# Altium footprint library FootPrintLib_8.PcbLib: 590 footprints (part 27 of 37)
Each footprint in its own frame and in the unit in brackets; x right, y up, seen from the top. Pads: shape width x height; smd on the part's side, far side on the other; paste and mask are expansions set on the pad; w line width, h text height; cw(c..) or ccw(c..) is an arc to the next point about the centre after c.
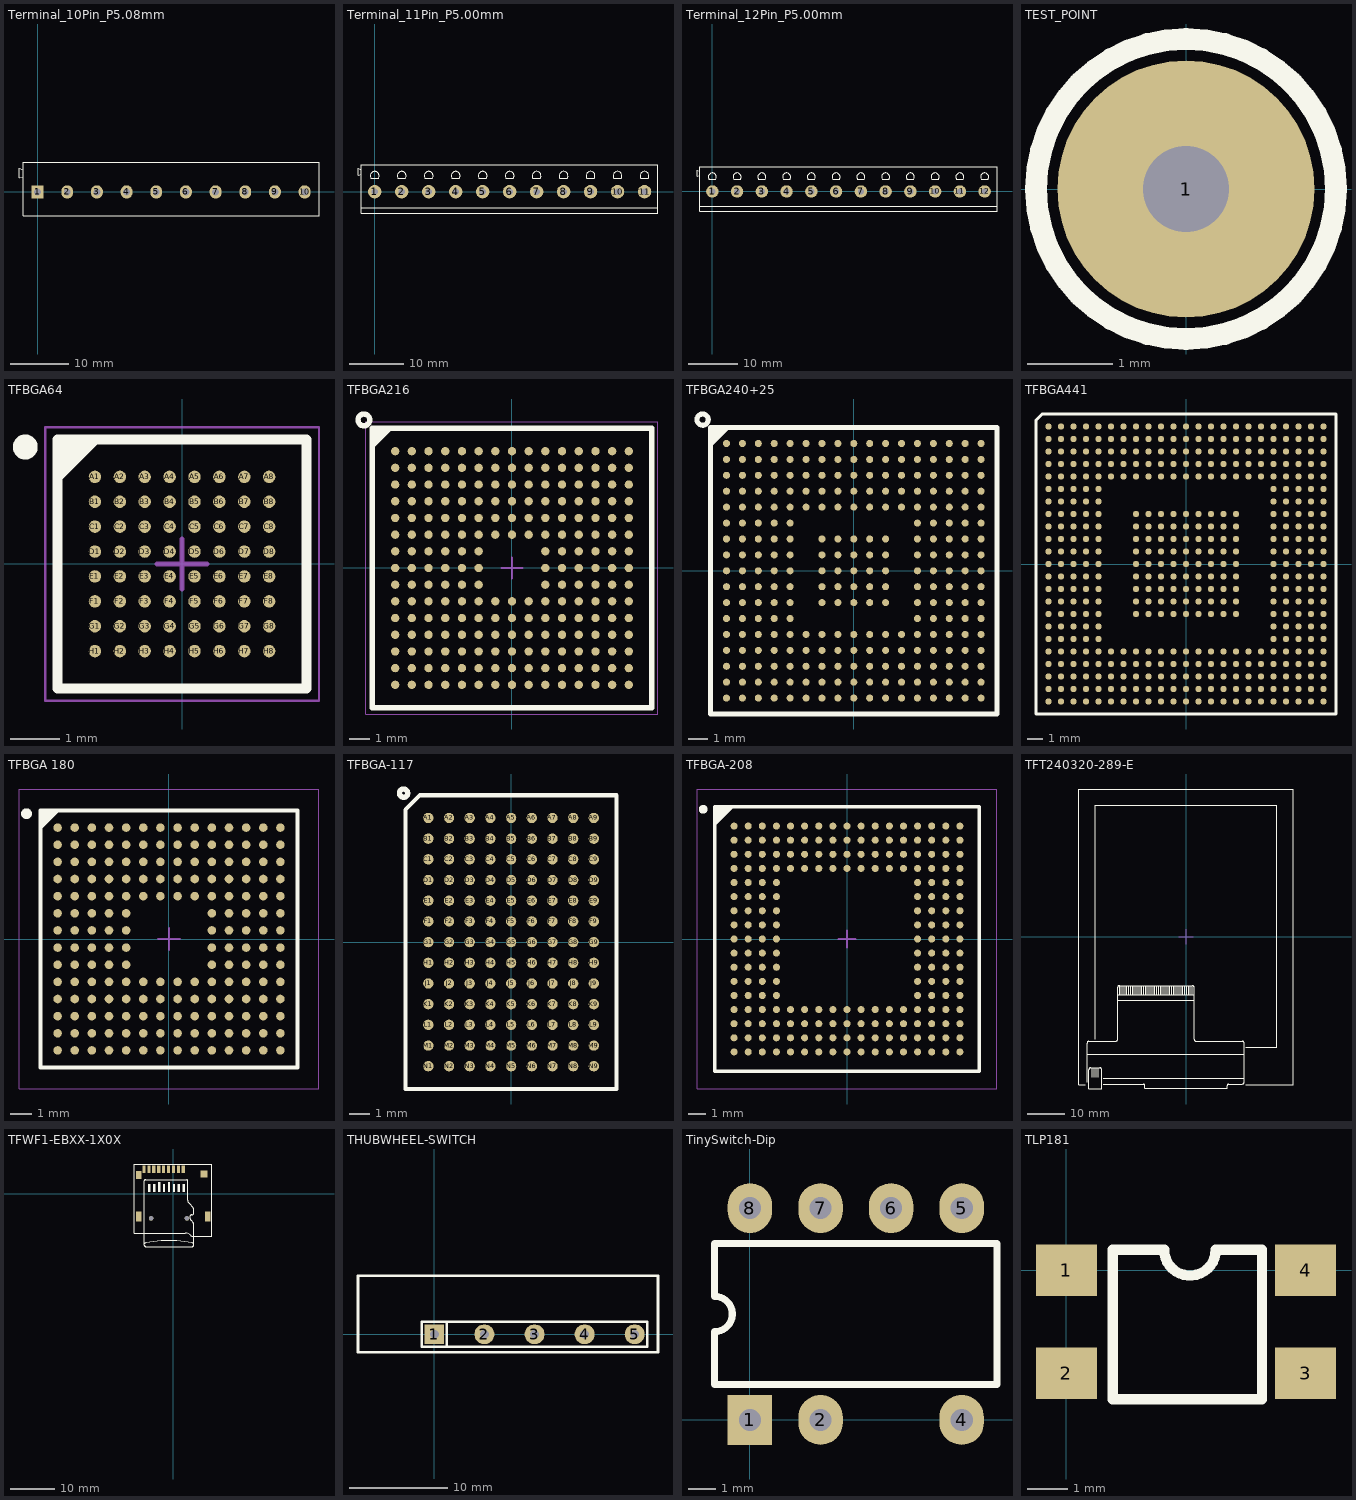
[diagram p26: the footprints below, top view; thin cyan lines are the x and y axes]

## Terminal_10Pin_P5.08mm [mil] "Terminal Block; 10Pin; Pitch 5.08mm;"
height 496.06
pads (10):
  rect 80x90 hole 46: 1(0.08,-0.13)
  oval 80x90 hole 46: 2(200.08,-0.13) 3(400.08,-0.13) 4(600.08,-0.13) 5(800.08,-0.13) 6(1000.08,-0.13) 7(1200.08,-0.13) 8(1400.08,-0.13) 9(1600.08,-0.13) 10(1800.08,-0.13)
Top Overlay:
  lines w7: -96.92,99.87 -124.92,95.2 -124.92,159.2 -96.92,149.87 ; -96.92,-160.13 -96.92,199.87 1897.08,199.87 1897.08,-160.13 -96.92,-160.13
3D body "Socket Blue_10Pin.STEP": height 493, standoff -263.18, extent -126.92,-160.63 1896.08,196.37

## Terminal_11Pin_P5.00mm [mm] "Terminal Block; 11Pin; Pitch 5.00mm; Body 5500x900mm"
height 12.6
pads (11):
  round 2.5 hole 1.2: 1(0,0) 2(5,0) 3(10,0) 4(15,0) 5(20,0) 6(25,0) 7(30,0) 8(35,0) 9(40,0) 10(45,0) 11(50,0)
Top Overlay:
  lines w0.2: -2.5,-3 52.5,-3 ; -2.5,3.275 -3.1,3.025 -3.1,4.325 -2.5,4.075 ; -2.5,-4 52.5,-4 52.5,5 -2.5,5 -2.5,-4 ; -0.7,2.5 cw(c0,2.929) 0.7,2.5 -0.7,2.5 ; 4.3,2.5 cw(c5,2.929) 5.7,2.5 4.3,2.5 ; 9.3,2.5 cw(c10,2.929) 10.7,2.5 9.3,2.5 ; 14.3,2.5 cw(c15,2.929) 15.7,2.5 14.3,2.5 ; 19.3,2.5 cw(c20,2.929) 20.7,2.5 19.3,2.5 ; 24.3,2.5 cw(c25,2.929) 25.7,2.5 24.3,2.5 ; 29.3,2.5 cw(c30,2.929) 30.7,2.5 29.3,2.5 ; 34.3,2.5 cw(c35,2.929) 35.7,2.5 34.3,2.5 ; 39.3,2.5 cw(c40,2.929) 40.7,2.5 39.3,2.5 ; 44.3,2.5 cw(c45,2.929) 45.7,2.5 44.3,2.5 ; 49.3,2.5 cw(c50,2.929) 50.7,2.5 49.3,2.5
3D body "terminal_blocks_a-tb500-ta11.stp": height 12.65, standoff -3.65, extent -3.1,-4 52.5,5

## Terminal_12Pin_P5.00mm [mm] "Terminal Block; 12Pin; Pitch 5.00mm; Body 6000x900mm"
height 12.6
pads (12):
  round 2.5 hole 1.2: 1(0,0) 2(5,0) 3(10,0) 4(15,0) 5(20,0) 6(25,0) 7(30,0) 8(35,0) 9(40,0) 10(45,0) 11(50,0) 12(55,0)
Top Overlay:
  lines w0.2: -2.5,-3 57.5,-3 ; -2.5,3.275 -3.1,3.025 -3.1,4.325 -2.5,4.075 ; -2.5,-4 57.5,-4 57.5,5 -2.5,5 -2.5,-4 ; -0.7,2.5 cw(c0,2.929) 0.7,2.5 -0.7,2.5 ; 4.3,2.5 cw(c5,2.929) 5.7,2.5 4.3,2.5 ; 9.3,2.5 cw(c10,2.929) 10.7,2.5 9.3,2.5 ; 14.3,2.5 cw(c15,2.929) 15.7,2.5 14.3,2.5 ; 19.3,2.5 cw(c20,2.929) 20.7,2.5 19.3,2.5 ; 24.3,2.5 cw(c25,2.929) 25.7,2.5 24.3,2.5 ; 29.3,2.5 cw(c30,2.929) 30.7,2.5 29.3,2.5 ; 34.3,2.5 cw(c35,2.929) 35.7,2.5 34.3,2.5 ; 39.3,2.5 cw(c40,2.929) 40.7,2.5 39.3,2.5 ; 44.3,2.5 cw(c45,2.929) 45.7,2.5 44.3,2.5 ; 49.3,2.5 cw(c50,2.929) 50.7,2.5 49.3,2.5 ; 54.3,2.5 cw(c55,2.929) 55.7,2.5 54.3,2.5
3D body "terminal_blocks_a-tb500-ta12.stp": height 12.65, standoff -3.65, extent -3.1,-4 57.5,5

## TEST_POINT [mm]
pads (1):
  round 3 hole 1: 1(0,0)
Top Overlay:
  circle w0.254: c0,0 r1.75

## TFBGA64 [mm] "BGA, 64-Balls, Body 5x5mm, Pitch 0.5mm"
height 1.2
pads (64):
  round 0.25 smd: A1(-1.75,1.75) A2(-1.25,1.75) A3(-0.75,1.75) A4(-0.25,1.75) A5(0.25,1.75) A6(0.75,1.75) A7(1.25,1.75) A8(1.75,1.75) B1(-1.75,1.25) B2(-1.25,1.25) B3(-0.75,1.25) B4(-0.25,1.25) B5(0.25,1.25) B6(0.75,1.25) B7(1.25,1.25) B8(1.75,1.25) C1(-1.75,0.75) C2(-1.25,0.75) C3(-0.75,0.75) C4(-0.25,0.75) C5(0.25,0.75) C6(0.75,0.75) C7(1.25,0.75) C8(1.75,0.75) D1(-1.75,0.25) D2(-1.25,0.25) D3(-0.75,0.25) D4(-0.25,0.25) D5(0.25,0.25) D6(0.75,0.25) D7(1.25,0.25) D8(1.75,0.25) E1(-1.75,-0.25) E2(-1.25,-0.25) E3(-0.75,-0.25) E4(-0.25,-0.25) E5(0.25,-0.25) E6(0.75,-0.25) E7(1.25,-0.25) E8(1.75,-0.25) F1(-1.75,-0.75) F2(-1.25,-0.75) F3(-0.75,-0.75) F4(-0.25,-0.75) F5(0.25,-0.75) F6(0.75,-0.75) F7(1.25,-0.75) F8(1.75,-0.75) G1(-1.75,-1.25) G2(-1.25,-1.25) G3(-0.75,-1.25) G4(-0.25,-1.25) G5(0.25,-1.25) G6(0.75,-1.25) G7(1.25,-1.25) G8(1.75,-1.25) H1(-1.75,-1.75) H2(-1.25,-1.75) H3(-0.75,-1.75) H4(-0.25,-1.75) H5(0.25,-1.75) H6(0.75,-1.75) H7(1.25,-1.75) H8(1.75,-1.75)
Top Overlay:
  circle w0.25: c-3.15,2.35 r0.125
  region: -1.742,2.5 -2.5,1.742 -2.5,2.5
  lines w0.2: -2.5,1.742 -1.742,2.5 ; -2.5,-2.5 2.5,-2.5 2.5,2.5 -2.5,2.5 -2.5,-2.5
Mechanical 13:
  lines w0.1: -2.5,-2.5 2.5,-2.5 2.5,2.5 -2.5,2.5 -2.5,-2.5
Mechanical 15:
  lines w0.05: -2.75,-2.75 2.75,-2.75 2.75,2.75 -2.75,2.75 -2.75,-2.75
  lines w0.1: -0.5,0 0.5,0 ; 0,-0.5 0,0.5
3D body: height 1.2, standoff 0.15, extent -2.5,-2.5 2.5,2.5

## TFBGA216 [mm]
pads (216):
  round 0.4 smd: A1(-5.6,5.6) A2(-4.8,5.6) A3(-4,5.6) A4(-3.2,5.6) A5(-2.4,5.6) A6(-1.6,5.6) A7(-0.8,5.6) A8(0,5.6) A9(0.8,5.6) A10(1.6,5.6) A11(2.4,5.6) A12(3.2,5.6) A13(4,5.6) A14(4.8,5.6) A15(5.6,5.6) B1(-5.6,4.8) B2(-4.8,4.8) B3(-4,4.8) B4(-3.2,4.8) B5(-2.4,4.8) B6(-1.6,4.8) B7(-0.8,4.8) B8(0,4.8) B9(0.8,4.8) B10(1.6,4.8) B11(2.4,4.8) B12(3.2,4.8) B13(4,4.8) B14(4.8,4.8) B15(5.6,4.8) C1(-5.6,4) C2(-4.8,4) C3(-4,4) C4(-3.2,4) C5(-2.4,4) C6(-1.6,4) C7(-0.8,4) C8(0,4) C9(0.8,4) C10(1.6,4) C11(2.4,4) C12(3.2,4) C13(4,4) C14(4.8,4) C15(5.6,4) D1(-5.6,3.2) D2(-4.8,3.2) D3(-4,3.2) D4(-3.2,3.2) D5(-2.4,3.2) D6(-1.6,3.2) D7(-0.8,3.2) D8(0,3.2) D9(0.8,3.2) D10(1.6,3.2) D11(2.4,3.2) D12(3.2,3.2) D13(4,3.2) D14(4.8,3.2) D15(5.6,3.2) E1(-5.6,2.4) E2(-4.8,2.4) E3(-4,2.4) E4(-3.2,2.4) E5(-2.4,2.4) E6(-1.6,2.4) E7(-0.8,2.4) E8(0,2.4) E9(0.8,2.4) E10(1.6,2.4) E11(2.4,2.4) E12(3.2,2.4) E13(4,2.4) E14(4.8,2.4) E15(5.6,2.4) F1(-5.6,1.6) F2(-4.8,1.6) F3(-4,1.6) F4(-3.2,1.6) F5(-2.4,1.6) F6(-1.6,1.6) F7(-0.8,1.6) F8(0,1.6) F9(0.8,1.6) F10(1.6,1.6) F11(2.4,1.6) F12(3.2,1.6) F13(4,1.6) F14(4.8,1.6) F15(5.6,1.6) G1(-5.6,0.8) G2(-4.8,0.8) G3(-4,0.8) G4(-3.2,0.8) G5(-2.4,0.8) G6(-1.6,0.8) G10(1.6,0.8) G11(2.4,0.8) G12(3.2,0.8) G13(4,0.8) G14(4.8,0.8) G15(5.6,0.8) H1(-5.6,0) H2(-4.8,0) H3(-4,0) H4(-3.2,0) H5(-2.4,0) H6(-1.6,0) H10(1.6,0) H11(2.4,0) H12(3.2,0) H13(4,0) H14(4.8,0) H15(5.6,0) J1(-5.6,-0.8) J2(-4.8,-0.8) J3(-4,-0.8) J4(-3.2,-0.8) J5(-2.4,-0.8) J6(-1.6,-0.8) J10(1.6,-0.8) J11(2.4,-0.8) J12(3.2,-0.8) J13(4,-0.8) J14(4.8,-0.8) J15(5.6,-0.8) K1(-5.6,-1.6) K2(-4.8,-1.6) K3(-4,-1.6) K4(-3.2,-1.6) K5(-2.4,-1.6) K6(-1.6,-1.6) K7(-0.8,-1.6) K8(0,-1.6) K9(0.8,-1.6) K10(1.6,-1.6) K11(2.4,-1.6) K12(3.2,-1.6) K13(4,-1.6) K14(4.8,-1.6) K15(5.6,-1.6) L1(-5.6,-2.4) L2(-4.8,-2.4) L3(-4,-2.4) L4(-3.2,-2.4) L5(-2.4,-2.4) L6(-1.6,-2.4) L7(-0.8,-2.4) L8(0,-2.4) L9(0.8,-2.4) L10(1.6,-2.4) L11(2.4,-2.4) L12(3.2,-2.4) L13(4,-2.4) L14(4.8,-2.4) L15(5.6,-2.4) M1(-5.6,-3.2) M2(-4.8,-3.2) M3(-4,-3.2) M4(-3.2,-3.2) M5(-2.4,-3.2) M6(-1.6,-3.2) M7(-0.8,-3.2) M8(0,-3.2) M9(0.8,-3.2) M10(1.6,-3.2) M11(2.4,-3.2) M12(3.2,-3.2) M13(4,-3.2) M14(4.8,-3.2) M15(5.6,-3.2) N1(-5.6,-4) N2(-4.8,-4) N3(-4,-4) N4(-3.2,-4) N5(-2.4,-4) N6(-1.6,-4) N7(-0.8,-4) N8(0,-4) N9(0.8,-4) N10(1.6,-4) N11(2.4,-4) N12(3.2,-4) N13(4,-4) N14(4.8,-4) N15(5.6,-4) P1(-5.6,-4.8) P2(-4.8,-4.8) P3(-4,-4.8) P4(-3.2,-4.8) P5(-2.4,-4.8) P6(-1.6,-4.8) P7(-0.8,-4.8) P8(0,-4.8) P9(0.8,-4.8) P10(1.6,-4.8) P11(2.4,-4.8) P12(3.2,-4.8) P13(4,-4.8) P14(4.8,-4.8) P15(5.6,-4.8) R1(-5.6,-5.6) R2(-4.8,-5.6) R3(-4,-5.6) R4(-3.2,-5.6) R5(-2.4,-5.6) R6(-1.6,-5.6) R7(-0.8,-5.6) R8(0,-5.6) R9(0.8,-5.6) R10(1.6,-5.6) R11(2.4,-5.6) R12(3.2,-5.6) R13(4,-5.6) R14(4.8,-5.6) R15(5.6,-5.6)
Top Overlay:
  circle w0.254: c-7.1,7.1 r0.283
  region: -6.7,6.7 -5.7,6.7 -6.7,5.7
  lines w0.25: -6.7,-6.7 6.7,-6.7 6.7,6.7 -6.7,6.7 -6.7,-6.7
Mechanical 15:
  lines w0.05: -7,-7 -7,7 7,7 7,-7 -7,-7
  lines w0.1: -0.5,0 0.5,0 ; 0,-0.5 0,0.5
3D body "User Library-TFBGA216.STEP": height 1.09, standoff -0.01, extent -6.5,-6.5 6.5,6.5

## TFBGA240+25 [mil]
pads (265):
  round 14 smd: A1(-251.97,251.97) A2(-220.47,251.97) A3(-188.97,251.97) A4(-157.48,251.97) A5(-125.98,251.97) A6(-94.49,251.97) A7(-62.99,251.97) A8(-31.49,251.97) A9(0,251.97) A10(31.5,251.97) A11(62.99,251.97) A12(94.49,251.97) A13(125.99,251.97) A14(157.48,251.97) A15(188.98,251.97) A16(220.47,251.97) A17(251.97,251.97) B1(-251.97,220.47) B2(-220.47,220.47) B3(-188.97,220.47) B4(-157.48,220.47) B5(-125.98,220.47) B6(-94.49,220.47) B7(-62.99,220.47) B8(-31.49,220.47) B9(0,220.47) B10(31.5,220.47) B11(62.99,220.47) B12(94.49,220.47) B13(125.99,220.47) B14(157.48,220.47) B15(188.98,220.47) B16(220.47,220.47) B17(251.97,220.47) C1(-251.97,188.97) C2(-220.47,188.97) C3(-188.97,188.97) C4(-157.48,188.97) C5(-125.98,188.97) C6(-94.49,188.97) C7(-62.99,188.97) C8(-31.49,188.97) C9(0,188.97) C10(31.5,188.97) C11(62.99,188.97) C12(94.49,188.97) C13(125.99,188.97) C14(157.48,188.97) C15(188.98,188.97) C16(220.47,188.97) C17(251.97,188.97) D1(-251.97,157.48) D2(-220.47,157.48) D3(-188.97,157.48) D4(-157.48,157.48) D5(-125.98,157.48) D6(-94.49,157.48) D7(-62.99,157.48) D8(-31.49,157.48) D9(0,157.48) D10(31.5,157.48) D11(62.99,157.48) D12(94.49,157.48) D13(125.99,157.48) D14(157.48,157.48) D15(188.98,157.48) D16(220.47,157.48) D17(251.97,157.48) E1(-251.97,125.98) E2(-220.47,125.98) E3(-188.97,125.98) E4(-157.48,125.98) E5(-125.98,125.98) E6(-94.49,125.98) E7(-62.99,125.98) E8(-31.49,125.98) E9(0,125.98) E10(31.5,125.98) E11(62.99,125.98) E12(94.49,125.98) E13(125.99,125.98) E14(157.48,125.98) E15(188.98,125.98) E16(220.47,125.98) E17(251.97,125.98) F1(-251.97,94.49) F2(-220.47,94.49) F3(-188.97,94.49) F4(-157.48,94.49) F5(-125.98,94.49) F13(125.99,94.49) F14(157.48,94.49) F15(188.98,94.49) F16(220.47,94.49) F17(251.97,94.49) G1(-251.97,62.99) G2(-220.47,62.99) G3(-188.97,62.99) G4(-157.48,62.99) G5(-125.98,62.99) G7(-62.99,62.99) G8(-31.49,62.99) G9(0,62.99) G10(31.5,62.99) G11(62.99,62.99) G13(125.99,62.99) G14(157.48,62.99) G15(188.98,62.99) G16(220.47,62.99) G17(251.97,62.99) H1(-251.97,31.49) H2(-220.47,31.49) H3(-188.97,31.49) H4(-157.48,31.49) H5(-125.98,31.49) H7(-62.99,31.49) H8(-31.49,31.49) H9(0,31.49) H10(31.5,31.49) H11(62.99,31.49) H13(125.99,31.49) H14(157.48,31.49) H15(188.98,31.49) H16(220.47,31.49) H17(251.97,31.49) J1(-251.97,0) J2(-220.47,0) J3(-188.97,0) J4(-157.48,0) J5(-125.98,0) J7(-62.99,0) J8(-31.49,0) J9(0,0) J10(31.5,0) J11(62.99,0) J13(125.99,0) J14(157.48,0) J15(188.98,0) J16(220.47,0) J17(251.97,0) K1(-251.97,-31.5) K2(-220.47,-31.5) K3(-188.97,-31.5) K4(-157.48,-31.5) K5(-125.98,-31.5) K7(-62.99,-31.5) K8(-31.49,-31.5) K9(0,-31.5) K10(31.5,-31.5) K11(62.99,-31.5) K13(125.99,-31.5) K14(157.48,-31.5) K15(188.98,-31.5) K16(220.47,-31.5) K17(251.97,-31.5) L1(-251.97,-62.99) L2(-220.47,-62.99) L3(-188.97,-62.99) L4(-157.48,-62.99) L5(-125.98,-62.99) L7(-62.99,-62.99) L8(-31.49,-62.99) L9(0,-62.99) L10(31.5,-62.99) L11(62.99,-62.99) L13(125.99,-62.99) L14(157.48,-62.99) L15(188.98,-62.99) L16(220.47,-62.99) L17(251.97,-62.99) M1(-251.97,-94.49) M2(-220.47,-94.49) M3(-188.97,-94.49) M4(-157.48,-94.49) M5(-125.98,-94.49) M13(125.99,-94.49) M14(157.48,-94.49) M15(188.98,-94.49) M16(220.47,-94.49) M17(251.97,-94.49) N1(-251.97,-125.99) N2(-220.47,-125.99) N3(-188.97,-125.99) N4(-157.48,-125.99) N5(-125.98,-125.99) N6(-94.49,-125.99) N7(-62.99,-125.99) N8(-31.49,-125.99) N9(0,-125.99) N10(31.5,-125.99) N11(62.99,-125.99) N12(94.49,-125.99) N13(125.99,-125.99) N14(157.48,-125.99) N15(188.98,-125.99) N16(220.47,-125.99) N17(251.97,-125.99) P1(-251.97,-157.48) P2(-220.47,-157.48) P3(-188.97,-157.48) P4(-157.48,-157.48) P5(-125.98,-157.48) P6(-94.49,-157.48) P7(-62.99,-157.48) P8(-31.49,-157.48) P9(0,-157.48) P10(31.5,-157.48) P11(62.99,-157.48) P12(94.49,-157.48) P13(125.99,-157.48) P14(157.48,-157.48) P15(188.98,-157.48) P16(220.47,-157.48) P17(251.97,-157.48) R1(-251.97,-188.98) R2(-220.47,-188.98) R3(-188.97,-188.98) R4(-157.48,-188.98) R5(-125.98,-188.98) R6(-94.49,-188.98) R7(-62.99,-188.98) R8(-31.49,-188.98) R9(0,-188.98) R10(31.5,-188.98) R11(62.99,-188.98) R12(94.49,-188.98) R13(125.99,-188.98) R14(157.48,-188.98) R15(188.98,-188.98) R16(220.47,-188.98) R17(251.97,-188.98) T1(-251.97,-220.47) T2(-220.47,-220.47) T3(-188.97,-220.47) T4(-157.48,-220.47) T5(-125.98,-220.47) T6(-94.49,-220.47) T7(-62.99,-220.47) T8(-31.49,-220.47) T9(0,-220.47) T10(31.5,-220.47) T11(62.99,-220.47) T12(94.49,-220.47) T13(125.99,-220.47) T14(157.48,-220.47) T15(188.98,-220.47) T16(220.47,-220.47) T17(251.97,-220.47) U1(-251.97,-251.97) U2(-220.47,-251.97) U3(-188.97,-251.97) U4(-157.48,-251.97) U5(-125.98,-251.97) U6(-94.49,-251.97) U7(-62.99,-251.97) U8(-31.49,-251.97) U9(0,-251.97) U10(31.5,-251.97) U11(62.99,-251.97) U12(94.49,-251.97) U13(125.99,-251.97) U14(157.48,-251.97) U15(188.98,-251.97) U16(220.47,-251.97) U17(251.97,-251.97)
Top Overlay:
  circle w10: c-299.21,299.21 r11.14
  region: -283.46,283.46 -244.09,283.46 -283.46,244.09
  lines w9.84: -283.46,-283.46 283.46,-283.46 283.46,283.46 -283.46,283.46 -283.46,-283.46
3D body "User Library-TFBGA272.STEP": height 2.47, standoff -54.62, extent -275.59,-275.59 275.59,275.59

## TFBGA441 [mm]
pads (441):
  round 0.4 smd: A1(-8.8,8.8) A2(-8,8.8) A3(-7.2,8.8) A4(-6.4,8.8) A5(-5.6,8.8) A6(-4.8,8.8) A7(-4,8.8) A8(-3.2,8.8) A9(-2.4,8.8) A10(-1.6,8.8) A11(-0.8,8.8) A12(0,8.8) A13(0.8,8.8) A14(1.6,8.8) A15(2.4,8.8) A16(3.2,8.8) A17(4,8.8) A18(4.8,8.8) A19(5.6,8.8) A20(6.4,8.8) A21(7.2,8.8) A22(8,8.8) A23(8.8,8.8) AA1(-8.8,-7.2) AA2(-8,-7.2) AA3(-7.2,-7.2) AA4(-6.4,-7.2) AA5(-5.6,-7.2) AA6(-4.8,-7.2) AA7(-4,-7.2) AA8(-3.2,-7.2) AA9(-2.4,-7.2) AA10(-1.6,-7.2) AA11(-0.8,-7.2) AA12(0,-7.2) AA13(0.8,-7.2) AA14(1.6,-7.2) AA15(2.4,-7.2) AA16(3.2,-7.2) AA17(4,-7.2) AA18(4.8,-7.2) AA19(5.6,-7.2) AA20(6.4,-7.2) AA21(7.2,-7.2) AA22(8,-7.2) AA23(8.8,-7.2) AB1(-8.8,-8) AB2(-8,-8) AB3(-7.2,-8) AB4(-6.4,-8) AB5(-5.6,-8) AB6(-4.8,-8) AB7(-4,-8) AB8(-3.2,-8) AB9(-2.4,-8) AB10(-1.6,-8) AB11(-0.8,-8) AB12(0,-8) AB13(0.8,-8) AB14(1.6,-8) AB15(2.4,-8) AB16(3.2,-8) AB17(4,-8) AB18(4.8,-8) AB19(5.6,-8) AB20(6.4,-8) AB21(7.2,-8) AB22(8,-8) AB23(8.8,-8) AC1(-8.8,-8.8) AC2(-8,-8.8) AC3(-7.2,-8.8) AC4(-6.4,-8.8) AC5(-5.6,-8.8) AC6(-4.8,-8.8) AC7(-4,-8.8) AC8(-3.2,-8.8) AC9(-2.4,-8.8) AC10(-1.6,-8.8) AC11(-0.8,-8.8) AC12(0,-8.8) AC13(0.8,-8.8) AC14(1.6,-8.8) AC15(2.4,-8.8) AC16(3.2,-8.8) AC17(4,-8.8) AC18(4.8,-8.8) AC19(5.6,-8.8) AC20(6.4,-8.8) AC21(7.2,-8.8) AC22(8,-8.8) AC23(8.8,-8.8) B1(-8.8,8) B2(-8,8) B3(-7.2,8) B4(-6.4,8) B5(-5.6,8) B6(-4.8,8) B7(-4,8) B8(-3.2,8) B9(-2.4,8) B10(-1.6,8) B11(-0.8,8) B12(0,8) B13(0.8,8) B14(1.6,8) B15(2.4,8) B16(3.2,8) B17(4,8) B18(4.8,8) B19(5.6,8) B20(6.4,8) B21(7.2,8) B22(8,8) B23(8.8,8) C1(-8.8,7.2) C2(-8,7.2) C3(-7.2,7.2) C4(-6.4,7.2) C5(-5.6,7.2) C6(-4.8,7.2) C7(-4,7.2) C8(-3.2,7.2) C9(-2.4,7.2) C10(-1.6,7.2) C11(-0.8,7.2) C12(0,7.2) C13(0.8,7.2) C14(1.6,7.2) C15(2.4,7.2) C16(3.2,7.2) C17(4,7.2) C18(4.8,7.2) C19(5.6,7.2) C20(6.4,7.2) C21(7.2,7.2) C22(8,7.2) C23(8.8,7.2) D1(-8.8,6.4) D2(-8,6.4) D3(-7.2,6.4) D4(-6.4,6.4) D5(-5.6,6.4) D6(-4.8,6.4) D7(-4,6.4) D8(-3.2,6.4) D9(-2.4,6.4) D10(-1.6,6.4) D11(-0.8,6.4) D12(0,6.4) D13(0.8,6.4) D14(1.6,6.4) D15(2.4,6.4) D16(3.2,6.4) D17(4,6.4) D18(4.8,6.4) D19(5.6,6.4) D20(6.4,6.4) D21(7.2,6.4) D22(8,6.4) D23(8.8,6.4) E1(-8.8,5.6) E2(-8,5.6) E3(-7.2,5.6) E4(-6.4,5.6) E5(-5.6,5.6) E6(-4.8,5.6) E7(-4,5.6) E8(-3.2,5.6) E9(-2.4,5.6) E10(-1.6,5.6) E11(-0.8,5.6) E12(0,5.6) E13(0.8,5.6) E14(1.6,5.6) E15(2.4,5.6) E16(3.2,5.6) E17(4,5.6) E18(4.8,5.6) E19(5.6,5.6) E20(6.4,5.6) E21(7.2,5.6) E22(8,5.6) E23(8.8,5.6) F1(-8.8,4.8) F2(-8,4.8) F3(-7.2,4.8) F4(-6.4,4.8) F5(-5.6,4.8) F19(5.6,4.8) F20(6.4,4.8) F21(7.2,4.8) F22(8,4.8) F23(8.8,4.8) G1(-8.8,4) G2(-8,4) G3(-7.2,4) G4(-6.4,4) G5(-5.6,4) G19(5.6,4) G20(6.4,4) G21(7.2,4) G22(8,4) G23(8.8,4) H1(-8.8,3.2) H2(-8,3.2) H3(-7.2,3.2) H4(-6.4,3.2) H5(-5.6,3.2) H8(-3.2,3.2) H9(-2.4,3.2) H10(-1.6,3.2) H11(-0.8,3.2) H12(0,3.2) H13(0.8,3.2) H14(1.6,3.2) H15(2.4,3.2) H16(3.2,3.2) H19(5.6,3.2) H20(6.4,3.2) H21(7.2,3.2) H22(8,3.2) H23(8.8,3.2) J1(-8.8,2.4) J2(-8,2.4) J3(-7.2,2.4) J4(-6.4,2.4) J5(-5.6,2.4) J8(-3.2,2.4) J9(-2.4,2.4) J10(-1.6,2.4) J11(-0.8,2.4) J12(0,2.4) J13(0.8,2.4) J14(1.6,2.4) J15(2.4,2.4) J16(3.2,2.4) J19(5.6,2.4) J20(6.4,2.4) J21(7.2,2.4) J22(8,2.4) J23(8.8,2.4) K1(-8.8,1.6) K2(-8,1.6) K3(-7.2,1.6) K4(-6.4,1.6) K5(-5.6,1.6) K8(-3.2,1.6) K9(-2.4,1.6) K10(-1.6,1.6) K11(-0.8,1.6) K12(0,1.6) K13(0.8,1.6) K14(1.6,1.6) K15(2.4,1.6) K16(3.2,1.6) K19(5.6,1.6) K20(6.4,1.6) K21(7.2,1.6) K22(8,1.6) K23(8.8,1.6) L1(-8.8,0.8) L2(-8,0.8) L3(-7.2,0.8) L4(-6.4,0.8) L5(-5.6,0.8) L8(-3.2,0.8) L9(-2.4,0.8) L10(-1.6,0.8) L11(-0.8,0.8) L12(0,0.8) L13(0.8,0.8) L14(1.6,0.8) L15(2.4,0.8) L16(3.2,0.8) L19(5.6,0.8) L20(6.4,0.8) L21(7.2,0.8) L22(8,0.8) L23(8.8,0.8) M1(-8.8,0) M2(-8,0) M3(-7.2,0) M4(-6.4,0) M5(-5.6,0) M8(-3.2,0) M9(-2.4,0) M10(-1.6,0) M11(-0.8,0) M12(0,0) M13(0.8,0) M14(1.6,0) M15(2.4,0) M16(3.2,0) M19(5.6,0) M20(6.4,0) M21(7.2,0) M22(8,0) M23(8.8,0) N1(-8.8,-0.8) N2(-8,-0.8) N3(-7.2,-0.8) N4(-6.4,-0.8) N5(-5.6,-0.8) N8(-3.2,-0.8) N9(-2.4,-0.8) N10(-1.6,-0.8) N11(-0.8,-0.8) N12(0,-0.8) N13(0.8,-0.8) N14(1.6,-0.8) N15(2.4,-0.8) N16(3.2,-0.8) N19(5.6,-0.8) N20(6.4,-0.8) N21(7.2,-0.8) N22(8,-0.8) N23(8.8,-0.8) P1(-8.8,-1.6) P2(-8,-1.6) P3(-7.2,-1.6) P4(-6.4,-1.6) P5(-5.6,-1.6) P8(-3.2,-1.6) P9(-2.4,-1.6) P10(-1.6,-1.6) P11(-0.8,-1.6) P12(0,-1.6) P13(0.8,-1.6) P14(1.6,-1.6) P15(2.4,-1.6) P16(3.2,-1.6) P19(5.6,-1.6) P20(6.4,-1.6) P21(7.2,-1.6) P22(8,-1.6) P23(8.8,-1.6) R1(-8.8,-2.4) R2(-8,-2.4) R3(-7.2,-2.4) R4(-6.4,-2.4) R5(-5.6,-2.4) R8(-3.2,-2.4) R9(-2.4,-2.4) R10(-1.6,-2.4) R11(-0.8,-2.4) R12(0,-2.4) R13(0.8,-2.4) R14(1.6,-2.4) R15(2.4,-2.4) R16(3.2,-2.4) R19(5.6,-2.4) R20(6.4,-2.4) R21(7.2,-2.4) R22(8,-2.4) R23(8.8,-2.4) T1(-8.8,-3.2) T2(-8,-3.2) T3(-7.2,-3.2) T4(-6.4,-3.2) T5(-5.6,-3.2) T8(-3.2,-3.2) T9(-2.4,-3.2) T10(-1.6,-3.2) T11(-0.8,-3.2) T12(0,-3.2) T13(0.8,-3.2) T14(1.6,-3.2) T15(2.4,-3.2) T16(3.2,-3.2) T19(5.6,-3.2) T20(6.4,-3.2) T21(7.2,-3.2) T22(8,-3.2) T23(8.8,-3.2) U1(-8.8,-4) U2(-8,-4) U3(-7.2,-4) U4(-6.4,-4) U5(-5.6,-4) U19(5.6,-4) U20(6.4,-4) U21(7.2,-4) U22(8,-4) U23(8.8,-4) V1(-8.8,-4.8) V2(-8,-4.8) V3(-7.2,-4.8) V4(-6.4,-4.8) V5(-5.6,-4.8) V19(5.6,-4.8) V20(6.4,-4.8) V21(7.2,-4.8) V22(8,-4.8) V23(8.8,-4.8) W1(-8.8,-5.6) W2(-8,-5.6) W3(-7.2,-5.6) W4(-6.4,-5.6) W5(-5.6,-5.6) W6(-4.8,-5.6) W7(-4,-5.6) W8(-3.2,-5.6) W9(-2.4,-5.6) W10(-1.6,-5.6) W11(-0.8,-5.6) W12(0,-5.6) W13(0.8,-5.6) W14(1.6,-5.6) W15(2.4,-5.6) W16(3.2,-5.6) W17(4,-5.6) W18(4.8,-5.6) W19(5.6,-5.6) W20(6.4,-5.6) W21(7.2,-5.6) W22(8,-5.6) W23(8.8,-5.6) Y1(-8.8,-6.4) Y2(-8,-6.4) Y3(-7.2,-6.4) Y4(-6.4,-6.4) Y5(-5.6,-6.4) Y6(-4.8,-6.4) Y7(-4,-6.4) Y8(-3.2,-6.4) Y9(-2.4,-6.4) Y10(-1.6,-6.4) Y11(-0.8,-6.4) Y12(0,-6.4) Y13(0.8,-6.4) Y14(1.6,-6.4) Y15(2.4,-6.4) Y16(3.2,-6.4) Y17(4,-6.4) Y18(4.8,-6.4) Y19(5.6,-6.4) Y20(6.4,-6.4) Y21(7.2,-6.4) Y22(8,-6.4) Y23(8.8,-6.4)
Top Overlay:
  lines w0.2: -9.6,-9.6 -9.6,9.2 -9.2,9.6 9.6,9.6 9.6,-9.6 -9.6,-9.6
3D body: height 1.4, standoff 0, extent -9.601,-9.601 9.601,9.601

## TFBGA 180 [mm]
pads (180):
  round 0.4 smd: A1(-5.2,5.2) A2(-4.4,5.2) A3(-3.6,5.2) A4(-2.8,5.2) A5(-2,5.2) A6(-1.2,5.2) A7(-0.4,5.2) A8(0.4,5.2) A9(1.2,5.2) A10(2,5.2) A11(2.8,5.2) A12(3.6,5.2) A13(4.4,5.2) A14(5.2,5.2) B1(-5.2,4.4) B2(-4.4,4.4) B3(-3.6,4.4) B4(-2.8,4.4) B5(-2,4.4) B6(-1.2,4.4) B7(-0.4,4.4) B8(0.4,4.4) B9(1.2,4.4) B10(2,4.4) B11(2.8,4.4) B12(3.6,4.4) B13(4.4,4.4) B14(5.2,4.4) C1(-5.2,3.6) C2(-4.4,3.6) C3(-3.6,3.6) C4(-2.8,3.6) C5(-2,3.6) C6(-1.2,3.6) C7(-0.4,3.6) C8(0.4,3.6) C9(1.2,3.6) C10(2,3.6) C11(2.8,3.6) C12(3.6,3.6) C13(4.4,3.6) C14(5.2,3.6) D1(-5.2,2.8) D2(-4.4,2.8) D3(-3.6,2.8) D4(-2.8,2.8) D5(-2,2.8) D6(-1.2,2.8) D7(-0.4,2.8) D8(0.4,2.8) D9(1.2,2.8) D10(2,2.8) D11(2.8,2.8) D12(3.6,2.8) D13(4.4,2.8) D14(5.2,2.8) E1(-5.2,2) E2(-4.4,2) E3(-3.6,2) E4(-2.8,2) E5(-2,2) E6(-1.2,2) E7(-0.4,2) E8(0.4,2) E9(1.2,2) E10(2,2) E11(2.8,2) E12(3.6,2) E13(4.4,2) E14(5.2,2) F1(-5.2,1.2) F2(-4.4,1.2) F3(-3.6,1.2) F4(-2.8,1.2) F5(-2,1.2) F10(2,1.2) F11(2.8,1.2) F12(3.6,1.2) F13(4.4,1.2) F14(5.2,1.2) G1(-5.2,0.4) G2(-4.4,0.4) G3(-3.6,0.4) G4(-2.8,0.4) G5(-2,0.4) G10(2,0.4) G11(2.8,0.4) G12(3.6,0.4) G13(4.4,0.4) G14(5.2,0.4) H1(-5.2,-0.4) H2(-4.4,-0.4) H3(-3.6,-0.4) H4(-2.8,-0.4) H5(-2,-0.4) H10(2,-0.4) H11(2.8,-0.4) H12(3.6,-0.4) H13(4.4,-0.4) H14(5.2,-0.4) J1(-5.2,-1.2) J2(-4.4,-1.2) J3(-3.6,-1.2) J4(-2.8,-1.2) J5(-2,-1.2) J10(2,-1.2) J11(2.8,-1.2) J12(3.6,-1.2) J13(4.4,-1.2) J14(5.2,-1.2) K1(-5.2,-2) K2(-4.4,-2) K3(-3.6,-2) K4(-2.8,-2) K5(-2,-2) K6(-1.2,-2) K7(-0.4,-2) K8(0.4,-2) K9(1.2,-2) K10(2,-2) K11(2.8,-2) K12(3.6,-2) K13(4.4,-2) K14(5.2,-2) L1(-5.2,-2.8) L2(-4.4,-2.8) L3(-3.6,-2.8) L4(-2.8,-2.8) L5(-2,-2.8) L6(-1.2,-2.8) L7(-0.4,-2.8) L8(0.4,-2.8) L9(1.2,-2.8) L10(2,-2.8) L11(2.8,-2.8) L12(3.6,-2.8) L13(4.4,-2.8) L14(5.2,-2.8) M1(-5.2,-3.6) M2(-4.4,-3.6) M3(-3.6,-3.6) M4(-2.8,-3.6) M5(-2,-3.6) M6(-1.2,-3.6) M7(-0.4,-3.6) M8(0.4,-3.6) M9(1.2,-3.6) M10(2,-3.6) M11(2.8,-3.6) M12(3.6,-3.6) M13(4.4,-3.6) M14(5.2,-3.6) N1(-5.2,-4.4) N2(-4.4,-4.4) N3(-3.6,-4.4) N4(-2.8,-4.4) N5(-2,-4.4) N6(-1.2,-4.4) N7(-0.4,-4.4) N8(0.4,-4.4) N9(1.2,-4.4) N10(2,-4.4) N11(2.8,-4.4) N12(3.6,-4.4) N13(4.4,-4.4) N14(5.2,-4.4) P1(-5.2,-5.2) P2(-4.4,-5.2) P3(-3.6,-5.2) P4(-2.8,-5.2) P5(-2,-5.2) P6(-1.2,-5.2) P7(-0.4,-5.2) P8(0.4,-5.2) P9(1.2,-5.2) P10(2,-5.2) P11(2.8,-5.2) P12(3.6,-5.2) P13(4.4,-5.2) P14(5.2,-5.2)
Top Overlay:
  circle w0.25: c-6.65,5.85 r0.125
  region: -5.213,6 -6,5.213 -6,6
  lines w0.2: -6,5.213 -5.213,6 ; -6,-6 -6,6 6,6 6,-6 -6,-6
Mechanical 13:
  lines w0.1: -6,-6 -6,6 6,6 6,-6 -6,-6
Mechanical 15:
  lines w0.05: -7,-7 -7,7 7,7 7,-7 -7,-7
  lines w0.1: -0.5,0 0.5,0 ; 0,-0.5 0,0.5
3D body: height 0.94, standoff -0.12, extent -6,-6 6,6

## TFBGA-117 [mm]
pads (117):
  round 0.5 smd: A1(-4,6) A2(-3,6) A3(-2,6) A4(-1,6) A5(0,6) A6(1,6) A7(2,6) A8(3,6) A9(4,6) B1(-4,5) B2(-3,5) B3(-2,5) B4(-1,5) B5(0,5) B6(1,5) B7(2,5) B8(3,5) B9(4,5) C1(-4,4) C2(-3,4) C3(-2,4) C4(-1,4) C5(0,4) C6(1,4) C7(2,4) C8(3,4) C9(4,4) D1(-4,3) D2(-3,3) D3(-2,3) D4(-1,3) D5(0,3) D6(1,3) D7(2,3) D8(3,3) D9(4,3) E1(-4,2) E2(-3,2) E3(-2,2) E4(-1,2) E5(0,2) E6(1,2) E7(2,2) E8(3,2) E9(4,2) F1(-4,1) F2(-3,1) F3(-2,1) F4(-1,1) F5(0,1) F6(1,1) F7(2,1) F8(3,1) F9(4,1) G1(-4,0) G2(-3,0) G3(-2,0) G4(-1,0) G5(0,0) G6(1,0) G7(2,0) G8(3,0) G9(4,0) H1(-4,-1) H2(-3,-1) H3(-2,-1) H4(-1,-1) H5(0,-1) H6(1,-1) H7(2,-1) H8(3,-1) H9(4,-1) J1(-4,-2) J2(-3,-2) J3(-2,-2) J4(-1,-2) J5(0,-2) J6(1,-2) J7(2,-2) J8(3,-2) J9(4,-2) K1(-4,-3) K2(-3,-3) K3(-2,-3) K4(-1,-3) K5(0,-3) K6(1,-3) K7(2,-3) K8(3,-3) K9(4,-3) L1(-4,-4) L2(-3,-4) L3(-2,-4) L4(-1,-4) L5(0,-4) L6(1,-4) L7(2,-4) L8(3,-4) L9(4,-4) M1(-4,-5) M2(-3,-5) M3(-2,-5) M4(-1,-5) M5(0,-5) M6(1,-5) M7(2,-5) M8(3,-5) M9(4,-5) N1(-4,-6) N2(-3,-6) N3(-2,-6) N4(-1,-6) N5(0,-6) N6(1,-6) N7(2,-6) N8(3,-6) N9(4,-6)
Top Overlay:
  circle w0.254: c-5.2,7.2 r0.2
  lines w0.2: -5.1,-7.1 -5.1,6.4 -4.4,7.1 5.1,7.1 5.1,-7.1 -5.1,-7.1
3D body: height 1.1, standoff 0, extent -5,-7 5,7

## TFBGA-208 [mm]
pads (208):
  round 0.4 smd: A1(-6.4,6.4) A2(-5.6,6.4) A3(-4.8,6.4) A4(-4,6.4) A5(-3.2,6.4) A6(-2.4,6.4) A7(-1.6,6.4) A8(-0.8,6.4) A9(0,6.4) A10(0.8,6.4) A11(1.6,6.4) A12(2.4,6.4) A13(3.2,6.4) A14(4,6.4) A15(4.8,6.4) A16(5.6,6.4) A17(6.4,6.4) B1(-6.4,5.6) B2(-5.6,5.6) B3(-4.8,5.6) B4(-4,5.6) B5(-3.2,5.6) B6(-2.4,5.6) B7(-1.6,5.6) B8(-0.8,5.6) B9(0,5.6) B10(0.8,5.6) B11(1.6,5.6) B12(2.4,5.6) B13(3.2,5.6) B14(4,5.6) B15(4.8,5.6) B16(5.6,5.6) B17(6.4,5.6) C1(-6.4,4.8) C2(-5.6,4.8) C3(-4.8,4.8) C4(-4,4.8) C5(-3.2,4.8) C6(-2.4,4.8) C7(-1.6,4.8) C8(-0.8,4.8) C9(0,4.8) C10(0.8,4.8) C11(1.6,4.8) C12(2.4,4.8) C13(3.2,4.8) C14(4,4.8) C15(4.8,4.8) C16(5.6,4.8) C17(6.4,4.8) D1(-6.4,4) D2(-5.6,4) D3(-4.8,4) D4(-4,4) D5(-3.2,4) D6(-2.4,4) D7(-1.6,4) D8(-0.8,4) D9(0,4) D10(0.8,4) D11(1.6,4) D12(2.4,4) D13(3.2,4) D14(4,4) D15(4.8,4) D16(5.6,4) D17(6.4,4) E1(-6.4,3.2) E2(-5.6,3.2) E3(-4.8,3.2) E4(-4,3.2) E14(4,3.2) E15(4.8,3.2) E16(5.6,3.2) E17(6.4,3.2) F1(-6.4,2.4) F2(-5.6,2.4) F3(-4.8,2.4) F4(-4,2.4) F14(4,2.4) F15(4.8,2.4) F16(5.6,2.4) F17(6.4,2.4) G1(-6.4,1.6) G2(-5.6,1.6) G3(-4.8,1.6) G4(-4,1.6) G14(4,1.6) G15(4.8,1.6) G16(5.6,1.6) G17(6.4,1.6) H1(-6.4,0.8) H2(-5.6,0.8) H3(-4.8,0.8) H4(-4,0.8) H14(4,0.8) H15(4.8,0.8) H16(5.6,0.8) H17(6.4,0.8) J1(-6.4,0) J2(-5.6,0) J3(-4.8,0) J4(-4,0) J14(4,0) J15(4.8,0) J16(5.6,0) J17(6.4,0) K1(-6.4,-0.8) K2(-5.6,-0.8) K3(-4.8,-0.8) K4(-4,-0.8) K14(4,-0.8) K15(4.8,-0.8) K16(5.6,-0.8) K17(6.4,-0.8) L1(-6.4,-1.6) L2(-5.6,-1.6) L3(-4.8,-1.6) L4(-4,-1.6) L14(4,-1.6) L15(4.8,-1.6) L16(5.6,-1.6) L17(6.4,-1.6) M1(-6.4,-2.4) M2(-5.6,-2.4) M3(-4.8,-2.4) M4(-4,-2.4) M14(4,-2.4) M15(4.8,-2.4) M16(5.6,-2.4) M17(6.4,-2.4) N1(-6.4,-3.2) N2(-5.6,-3.2) N3(-4.8,-3.2) N4(-4,-3.2) N14(4,-3.2) N15(4.8,-3.2) N16(5.6,-3.2) N17(6.4,-3.2) P1(-6.4,-4) P2(-5.6,-4) P3(-4.8,-4) P4(-4,-4) P5(-3.2,-4) P6(-2.4,-4) P7(-1.6,-4) P8(-0.8,-4) P9(0,-4) P10(0.8,-4) P11(1.6,-4) P12(2.4,-4) P13(3.2,-4) P14(4,-4) P15(4.8,-4) P16(5.6,-4) P17(6.4,-4) R1(-6.4,-4.8) R2(-5.6,-4.8) R3(-4.8,-4.8) R4(-4,-4.8) R5(-3.2,-4.8) R6(-2.4,-4.8) R7(-1.6,-4.8) R8(-0.8,-4.8) R9(0,-4.8) R10(0.8,-4.8) R11(1.6,-4.8) R12(2.4,-4.8) R13(3.2,-4.8) R14(4,-4.8) R15(4.8,-4.8) R16(5.6,-4.8) R17(6.4,-4.8) T1(-6.4,-5.6) T2(-5.6,-5.6) T3(-4.8,-5.6) T4(-4,-5.6) T5(-3.2,-5.6) T6(-2.4,-5.6) T7(-1.6,-5.6) T8(-0.8,-5.6) T9(0,-5.6) T10(0.8,-5.6) T11(1.6,-5.6) T12(2.4,-5.6) T13(3.2,-5.6) T14(4,-5.6) T15(4.8,-5.6) T16(5.6,-5.6) T17(6.4,-5.6) U1(-6.4,-6.4) U2(-5.6,-6.4) U3(-4.8,-6.4) U4(-4,-6.4) U5(-3.2,-6.4) U6(-2.4,-6.4) U7(-1.6,-6.4) U8(-0.8,-6.4) U9(0,-6.4) U10(0.8,-6.4) U11(1.6,-6.4) U12(2.4,-6.4) U13(3.2,-6.4) U14(4,-6.4) U15(4.8,-6.4) U16(5.6,-6.4) U17(6.4,-6.4)
Top Overlay:
  circle w0.25: c-8.15,7.35 r0.125
  region: -6.5,7.5 -7.5,6.5 -7.5,7.5
  lines w0.2: -7.5,6.5 -6.5,7.5 ; -7.5,-7.5 7.5,-7.5 7.5,7.5 -7.5,7.5 -7.5,-7.5
Mechanical 13:
  lines w0.1: -7.5,-7.5 7.5,-7.5 7.5,7.5 -7.5,7.5 -7.5,-7.5
Mechanical 15:
  lines w0.05: -8.5,-8.5 8.5,-8.5 8.5,8.5 -8.5,8.5 -8.5,-8.5
  lines w0.1: -0.5,0 0.5,0 ; 0,-0.5 0,0.5
3D body: height 1.21, standoff 0, extent -7.5,-7.5 7.5,7.5

## TFT240320-289-E [mm]
height 3.65
Top Overlay:
  lines w0.254: -27.01,-39.6 -28.77,-39.6 -28.77,39.6 28.77,39.6 28.77,-39.6 16.06,-39.6 ; -26.51,-38.98 -26.51,-28.48 cw(c-26.01,-28.48) -26.01,-27.98 -18.82,-27.98 ccw(c-18.82,-27.48) -18.32,-27.48 -18.32,-13.58 cw(c-17.82,-13.58) -17.82,-13.08 ; -26.51,-31.48 15.56,-31.48 ; -25.07,-37.6 -25.07,-35.1 ; -24.57,-37.6 -24.57,-35.1 ; -24.3,-27.48 -24.3,35.2 24.3,35.2 24.3,-29.6 16.06,-29.6 ; -24.07,-37.6 -24.07,-35.1 ; -23.57,-37.6 -23.57,-35.1 ; -22.12,-39.48 -11.5,-39.48 cw(c-11.5,-39.98) -11,-39.98 -11,-40.6 11,-40.6 11,-39.98 cw(c11.5,-39.98) 11.5,-39.48 15.06,-39.48 ccw(c15.06,-38.98) 15.56,-38.98 15.56,-28.48 ccw(c15.06,-28.48) 15.06,-27.98 2.68,-27.98 cw(c2.68,-27.48) 2.18,-27.48 2.18,-13.58 ccw(c1.68,-13.58) 1.68,-13.08 ; -22.12,-37.98 15.56,-37.98 ; -18.32,-17.08 2.18,-17.08 ; -18.32,-15.58 2.18,-15.58 ; -17.82,-15.58 -17.82,-13.08 ; -17.32,-15.58 -17.32,-13.08 ; -16.82,-15.58 -16.82,-13.08 ; -16.32,-15.58 -16.32,-13.08 ; -15.82,-15.58 -15.82,-13.08 ; -15.32,-15.58 -15.32,-13.08 ; -14.82,-15.58 -14.82,-13.08 ; -14.32,-15.58 -14.32,-13.08 ; -13.82,-15.58 -13.82,-13.08 ; -13.32,-15.58 -13.32,-13.08 ; -12.82,-15.58 -12.82,-13.08 ; -12.32,-15.58 -12.32,-13.08 ; -11.82,-15.58 -11.82,-13.08 ; -11.32,-15.58 -11.32,-13.08 ; -10.82,-15.58 -10.82,-13.08 ; -10.32,-15.58 -10.32,-13.08 ; -9.82,-15.58 -9.82,-13.08 ; -9.32,-15.58 -9.32,-13.08 ; -8.82,-15.58 -8.82,-13.08 ; -8.32,-15.58 -8.32,-13.08 ; -7.82,-15.58 -7.82,-13.08 ; -7.32,-15.58 -7.32,-13.08 ; -6.82,-15.58 -6.82,-13.08 ; -6.32,-15.58 -6.32,-13.08 ; -5.82,-15.58 -5.82,-13.08 ; -5.32,-15.58 -5.32,-13.08 ; -4.82,-15.58 -4.82,-13.08 ; -4.32,-15.58 -4.32,-13.08 ; -3.82,-15.58 -3.82,-13.08 ; -3.32,-15.58 -3.32,-13.08 ; -2.82,-15.58 -2.82,-13.08 ; -2.32,-15.58 -2.32,-13.08 ; -1.82,-15.58 -1.82,-13.08 ; -1.32,-15.58 -1.32,-13.08 ; -0.82,-15.58 -0.82,-13.08 ; -0.32,-15.58 -0.32,-13.08 ; 0.18,-15.58 0.18,-13.08 ; 0.68,-15.58 0.68,-13.08 ; 1.18,-15.58 1.18,-13.08 ; 1.68,-15.58 1.68,-13.08 ; -17.82,-13.08 1.68,-13.08 ; -26.02,-40.8 -26.02,-35.6 cw(c-25.52,-35.6) -25.52,-35.1 -23.12,-35.1 cw(c-23.12,-35.6) -22.62,-35.6 -22.62,-40.8 -26.02,-40.8
Mechanical 15:
  lines w0.2: -2,0 2,0 ; 0,-2 0,2

## TFWF1-EBXX-1X0X [mm] "T-FLASH PUSH-PUSH"
height 2
pads (15):
  round 1 hole 1 unplated: 0(-4.95,-5.5) 0(3.05,-5.5)
  rect 0.7x1.6 smd: 1(2.25,5.5) 2(1.15,5.5) 3(0.05,5.5) 4(-1.05,5.5) 5(-2.15,5.5) 6(-3.25,5.5) 7(-4.35,5.5) 8(-5.45,5.5) 9(-6.55,5.5)
  rect 1.2x1.8 smd: 10(-7.75,4.2)
  rect 1.2x2.2 smd: 11(-7.75,-5.1) 12(7.75,-5.1)
  rect 1.6x1.5 smd: 13(6.85,4.45)
Top Overlay:
  rectangle: 2.096,0.4 2.604,2.254
  rectangle: 0.996,0.4 1.504,2.254
  rectangle: -0.104,0.4 0.404,2.254
  rectangle: -1.204,0.4 -0.696,2.635
  rectangle: -2.304,0.4 -1.796,2.254
  rectangle: -3.404,0.4 -2.896,2.635
  rectangle: -4.504,0.4 -3.996,2.254
  rectangle: -5.604,0.4 -5.096,2.254
  lines w0.2: -6.437,-11.153 cw(c-6.027,-11.564) -6.148,-10.996 cw(c-0.95,-35.45) 4.248,-10.996 cw(c4.127,-11.564) 4.537,-11.153 ; 3.85,-5.622 3.85,-4.904 cw(c4.104,-4.904) 4.104,-4.65 4.296,-4.65 ccw(c4.296,-4.396) 4.55,-4.396 4.55,-3.36 ccw(c4.042,-3.36) 4.401,-3.001 3.55,-2.15 cw(c4.274,-1.426) 3.25,-1.426 3.25,2.946 ccw(c2.996,2.946) 2.996,3.2 -6.196,3.2 ccw(c-6.196,2.946) -6.45,2.946 -6.45,-11.546 ccw(c-6.196,-11.546) -6.196,-11.8 4.296,-11.8 ccw(c4.296,-11.546) 4.55,-11.546 4.55,-6.71 ; 3.85,-5.59 ccw(c4.358,-5.59) 3.999,-5.949 4.401,-6.351 cw(c4.042,-6.71) 4.55,-6.71
  lines w0.254: -8.687,-8.8 2.685,-8.8 cw(c2.685,-10.574) 3.94,-9.32 ccw(c4.375,-8.884) 4.375,-9.5 8.661,-9.5 8.661,6.68 -8.687,6.68 -8.687,-8.8
3D body "User Library-MEM2055-00-190-01-A_revG.STEP": height 1.85, standoff -0.6, extent -8.001,-9.53 7.999,5.72
3D body "SW3dPS-Micro_SD.STEP": height 1.7, standoff 0.72, extent -6.389,-11.811 4.611,3.189

## THUBWHEEL-SWITCH [mm]
pads (5):
  rect 2x2 hole 0.9: 1(0,0)
  oval 2.032x2 hole 0.9: 2(5.08,0) 3(10.16,0) 4(15.24,0) 5(20.32,0)
Top Overlay:
  lines w0.254: 1.27,-1.27 1.27,1.27 ; 17.272,1.27 21.59,1.27 21.59,-1.27 17.78,-1.27 ; 17.7,1.27 -1.27,1.27 -1.27,-1.27 18.233,-1.27 ; -7.747,-1.829 -7.747,5.944 22.682,5.944 22.682,-1.829 -7.747,-1.829

## TinySwitch-Dip [mm]
pads (7):
  rect 1.6x1.8 hole 0.8: 1(0,0)
  oval 1.6x1.8 hole 0.8: 2(2.54,0) 4(7.62,0) 5(7.62,7.62) 6(5.08,7.62) 7(2.54,7.62) 8(0,7.62)
Top Overlay:
  lines w0.254: -1.27,1.27 -1.27,3.175 ccw(c-1.27,3.81) -1.27,4.445 -1.27,6.35 8.89,6.35 8.89,1.27 -1.27,1.27

## TLP181 [mm]
pads (4):
  rect 1.5x1.27 smd: 1(0,0) 2(0,-2.54) 3(5.9,-2.54) 4(5.9,0)
Top Overlay:
  lines w0.254: 1.143,-3.175 4.826,-3.175 4.826,0.508 3.683,0.508 cw(c3.048,0.508) 2.413,0.508 1.143,0.508 1.143,-3.175